# Altium integrated library FG28C0G2A681JNT00.IntLib: 1 symbol
Pins are listed as number, name and electrical type; pins without a type are passive.

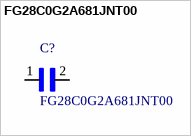
[diagram p0: symbol FG28C0G2A681JNT00]

## FG28C0G2A681JNT00
designator C?
MANUFACTURER: TDK; MAXIMUM_PACKAGE_HEIGHT: 0.0 mm; PARTREV: 20200310; SOURCE_URL: https://www.snapeda.com/parts/FG28C0G2A681JNT00/TDK/view-part/?ref=snap; STANDARD: IPC-7351B; Value: *
footprint *CAPRB500W50L400T250H550
pins: 1, 2